# Altium schematic symbol library VJ0805Y105KXQTW1BC.SchLib: 1 symbol
Pins are listed as number, name and electrical type; pins without a type are passive.

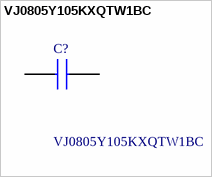
[diagram p0: symbol VJ0805Y105KXQTW1BC]

## VJ0805Y105KXQTW1BC
designator C?
1 µF ±10% 10V Ceramic Capacitor X7R 0805 (2012 Metric); Manufacturer_Name: Vishay; Geometry.Height: 1.35mm; Mouser Part Number: 77-VJ0805Y105KXQTBC; Mouser Price/Stock: https://www.mouser.co.uk/ProductDetail/Vishay-Vitramon/VJ0805Y105KXQTW1BC?qs=F2lBERbFaaHnNHh23%2Flzkg%3D%3D; Manufacturer_Part_Number: VJ0805Y105KXQTW1BC; Datasheet Link: https://www.vishay.com/docs/28548/vjw1bcbascomseries.pdf
footprint CAPC2012X135N
pins: 1, 2